# Altium footprint library Propia.PcbLib: 378 footprints (part 1 of 24)
Each footprint in its own frame and in the unit in brackets; x right, y up, seen from the top. Pads: shape width x height; smd on the part's side, far side on the other; paste and mask are expansions set on the pad; w line width, h text height; cw(c..) or ccw(c..) is an arc to the next point about the centre after c.
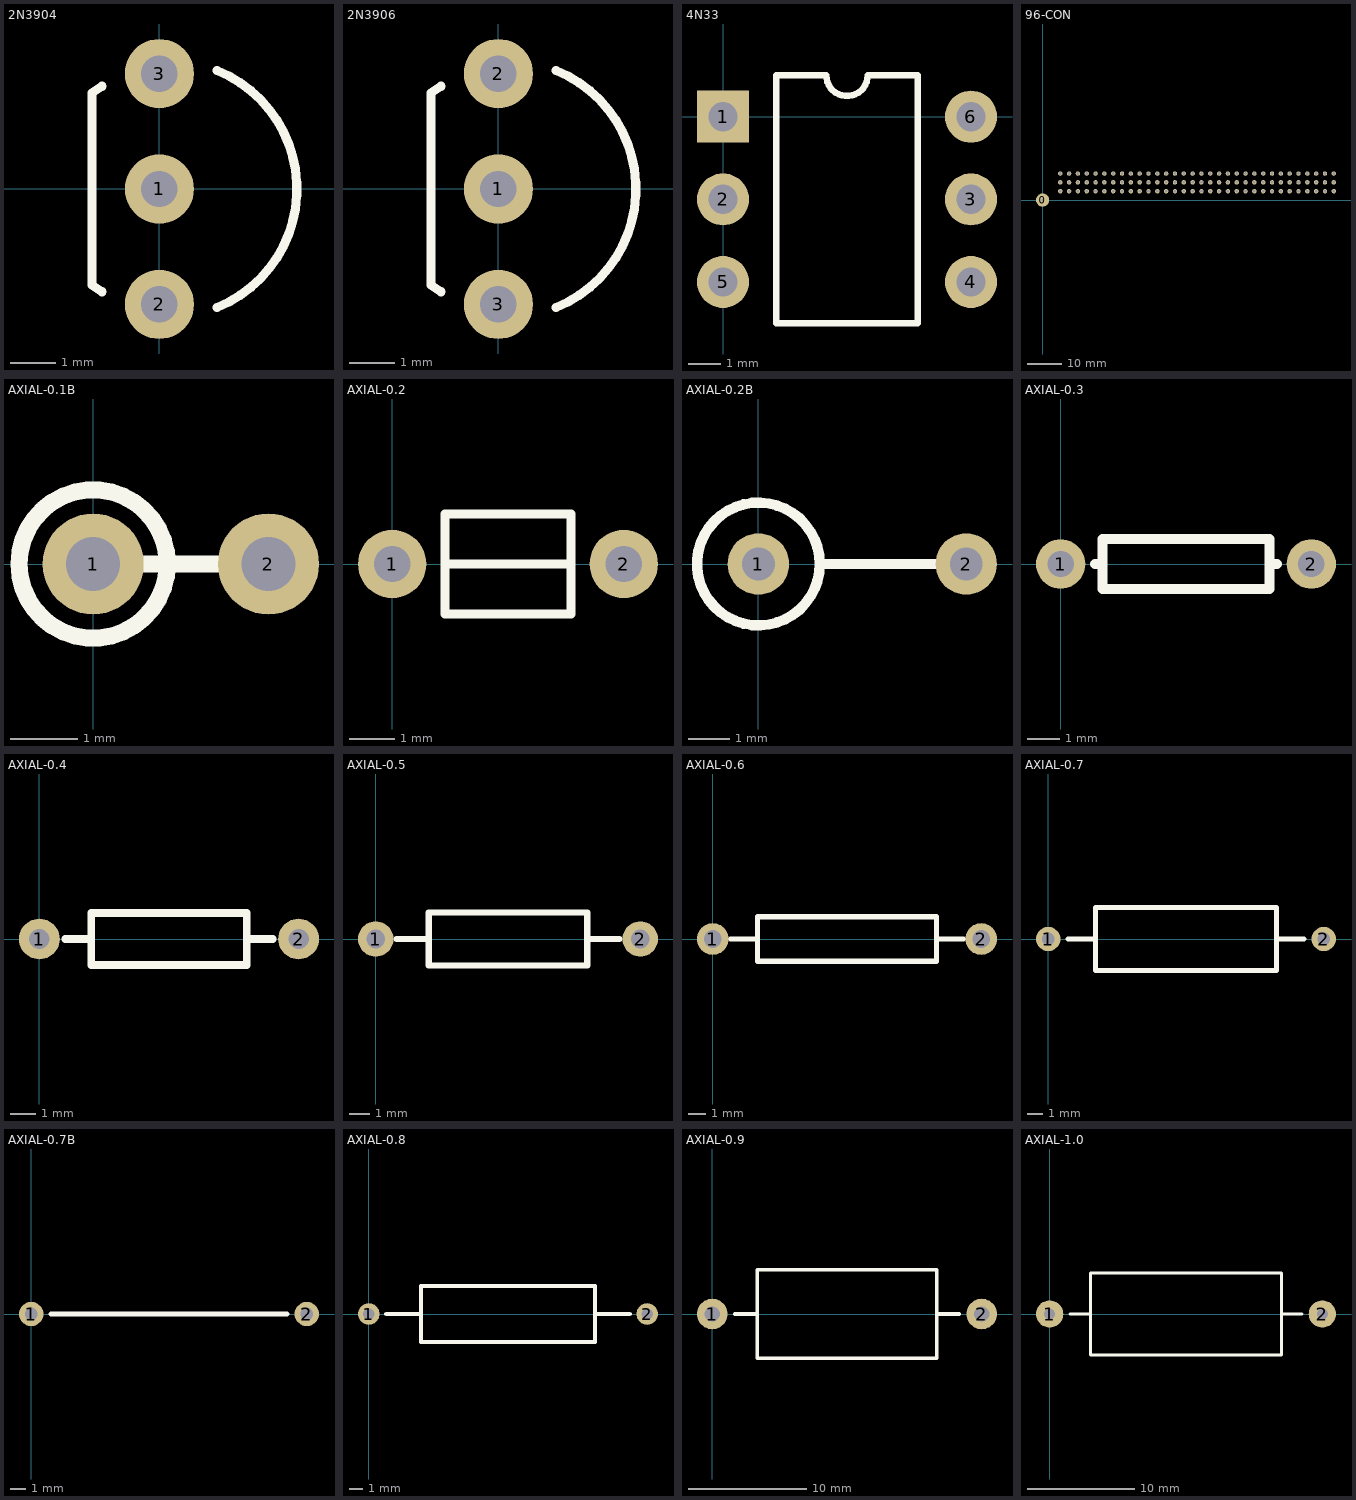
[diagram p0: the footprints below, top view; thin cyan lines are the x and y axes]

## 2N3904 [mil]
pads (3):
  round 60 hole 31.5: 1(0,0) 2(0,-100) 3(0,100)
TopOverlay:
  lines w7.87: -49.71,-89.08 -58.33,-83.33 -58.33,83.33 -49.71,89.08 ; 49.85,-102.76 ccw(c8.33,0) 49.85,102.76

## 2N3906 [mil]
pads (3):
  round 60 hole 31.5: 1(0,0) 2(0,100) 3(0,-100)
TopOverlay:
  lines w7.87: -49.71,-89.08 -58.33,-83.33 -58.33,83.33 -49.71,89.08 ; 49.85,-102.76 ccw(c8.33,0) 49.85,102.76

## 4N33 [mm]
pads (6):
  rect 1.6x1.6 hole 0.9: 1(0,0)
  round 1.6 hole 0.9: 2(0,-2.54) 3(7.62,-2.54) 4(7.62,-5.08) 5(0,-5.08) 6(7.62,0)
TopOverlay:
  lines w0.2: 1.635,-6.35 1.635,1.27 3.175,1.27 ccw(c3.81,1.27) 4.445,1.27 5.985,1.27 5.985,-6.35 1.635,-6.35

## 96-CON [mil]
pads (97):
  round 150 hole 30: 0(0,0)
  round 50 hole 30: 1(3300,300) 2(3200,300) 3(3100,300) 4(3000,300) 5(2900,300) 6(2800,300) 7(2700,300) 8(2600,300) 9(2500,300) 10(2400,300) 11(2300,300) 12(2200,300) 13(2100,300) 14(2000,300) 15(1900,300) 16(1800,300) 17(1700,300) 18(1600,300) 19(1500,300) 20(1400,300) 21(1300,300) 22(1200,300) 23(1100,300) 24(1000,300) 25(900,300) 26(800,300) 27(700,300) 28(600,300) 29(500,300) 30(400,300) 31(300,300) 32(200,300) 33(3300,200) 34(3200,200) 35(3100,200) 36(3000,200) 37(2900,200) 38(2800,200) 39(2700,200) 40(2600,200) 41(2500,200) 42(2400,200) 43(2300,200) 44(2200,200) 45(2100,200) 46(2000,200) 47(1900,200) 48(1800,200) 49(1700,200) 50(1600,200) 51(1500,200) 52(1400,200) 53(1300,200) 54(1200,200) 55(1100,200) 56(1000,200) 57(900,200) 58(800,200) 59(700,200) 60(600,200) 61(500,200) 62(400,200) 63(300,200) 64(200,200) 65(3300,100) 66(3200,100) 67(3100,100) 68(3000,100) 69(2900,100) 70(2800,100) 71(2700,100) 72(2600,100) 73(2500,100) 74(2400,100) 75(2300,100) 76(2200,100) 77(2100,100) 78(2000,100) 79(1900,100) 80(1800,100) 81(1700,100) 82(1600,100) 83(1500,100) 84(1400,100) 85(1300,100) 86(1200,100) 87(1100,100) 88(1000,100) 89(900,100) 90(800,100) 91(700,100) 92(600,100) 93(500,100) 94(400,100) 95(300,100) 96(200,100)

## AXIAL-0.1B [mm]
pads (2):
  round 1.5 hole 0.8: 1(0,0) 2(2.6,0)
TopOverlay:
  circle w0.254: c0,0 r1.1
  lines w0.254: 0,0 2.6,0

## AXIAL-0.2 [mm]
pads (2):
  round 1.5 hole 0.8: 1(0,0) 2(5.08,0)
TopOverlay:
  lines w0.2: 1.155,0 3.58,0 ; 1.5,0 3.925,0 ; 3.925,0 3.925,-1.1 1.155,-1.1 1.155,1.1 3.925,1.1 3.925,0

## AXIAL-0.2B [mm]
pads (2):
  round 1.5 hole 0.8: 1(0,0) 2(5.08,0)
TopOverlay:
  circle w0.254: c0,0 r1.5
  lines w0.254: 1.5,0 4.3,0

## AXIAL-0.3 [mm]
pads (2):
  round 1.5 hole 0.8: 1(0,0) 2(7.62,0)
TopOverlay:
  lines w0.305: 1.041,0 1.27,0 ; 6.579,0 6.35,0 ; 6.35,0 6.35,-0.762 1.27,-0.762 1.27,0.762 6.35,0.762 6.35,0

## AXIAL-0.4 [mm]
pads (2):
  round 1.6 hole 0.8: 1(0,0) 2(10.16,0)
TopOverlay:
  lines w0.305: 1.016,0 2.032,0 ; 8.128,0 9.144,0 ; 2.032,-1.016 2.032,1.016 8.128,1.016 8.128,-1.016 2.032,-1.016

## AXIAL-0.5 [mm]
pads (2):
  round 1.7 hole 0.9: 1(0,0) 2(12.7,0)
TopOverlay:
  lines w0.305: 1.016,0 2.54,0 ; 10.16,0 11.684,0 ; 2.54,-1.27 2.54,1.27 10.16,1.27 10.16,-1.27 2.54,-1.27

## AXIAL-0.6 [mm]
pads (2):
  round 1.8 hole 1: 1(0,0) 2(15.24,0)
TopOverlay:
  lines w0.305: 1.016,0 2.54,0 ; 12.7,0 14.224,0 ; 2.54,-1.27 12.7,-1.27 12.7,1.27 2.54,1.27 2.54,-1.27

## AXIAL-0.7 [mil]
pads (2):
  round 62 hole 32: 1(0,0) 2(700,0)
TopOverlay:
  lines w12: 50,0 120,0 ; 580,0 650,0 ; 120,-80 580,-80 580,80 120,80 120,-80

## AXIAL-0.7B [mil]
pads (2):
  round 62 hole 32: 1(0,0) 2(700,0)
TopOverlay:
  lines w12: 50,0 120,0 ; 114.17,0 650,0

## AXIAL-0.8 [mil]
pads (2):
  round 62 hole 32: 1(0,0) 2(800,0)
TopOverlay:
  lines w12: 50,0 150,0 ; 650,0 750,0 ; 150,-80 650,-80 650,80 150,80 150,-80

## AXIAL-0.9 [mm]
pads (2):
  round 2.6 hole 1.3: 1(0,0) 2(22.86,0)
TopOverlay:
  lines w0.305: 1.905,0 3.81,0 ; 19.05,0 20.955,0 ; 3.81,-3.75 3.81,3.75 19.05,3.75 19.05,-3.75 3.81,-3.75

## AXIAL-1.0 [mil]
pads (2):
  round 100 hole 40: 1(0,0) 2(1000,0)
TopOverlay:
  lines w12: 75,0 150,0 ; 850,0 925,0 ; 150,-150 850,-150 850,150 150,150 150,-150